# Altium schematic symbol library SN74LVC2G04DBVR.SchLib: 1 symbol
Pins are listed as number, name and electrical type; pins without a type are passive.

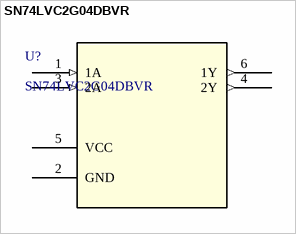
[diagram p0: symbol SN74LVC2G04DBVR]

## SN74LVC2G04DBVR
designator U?
2-ch, 1.65-V to 5.5-V inverters 6-SOT-23 -40 to 125; Manufacturer_Name: Texas Instruments; Copyright: Copyright (C) 2025 Ultra Librarian. All rights reserved.; Manufacturer_Part_Number: SN74LVC2G04DBVR; RefDes: RefDes; Type: Type
footprint DBV6
pins: 1 1A (in), 2 GND (power), 3 2A (in), 4 2Y (out), 5 VCC (power), 6 1Y (out)